# Altium footprint library DW254R-22-16-85.PcbLib: 1 footprints
Each footprint in its own frame and in the unit in brackets; x right, y up, seen from the top. Pads: shape width x height; smd on the part's side, far side on the other; paste and mask are expansions set on the pad; w line width, h text height; cw(c..) or ccw(c..) is an arc to the next point about the centre after c.
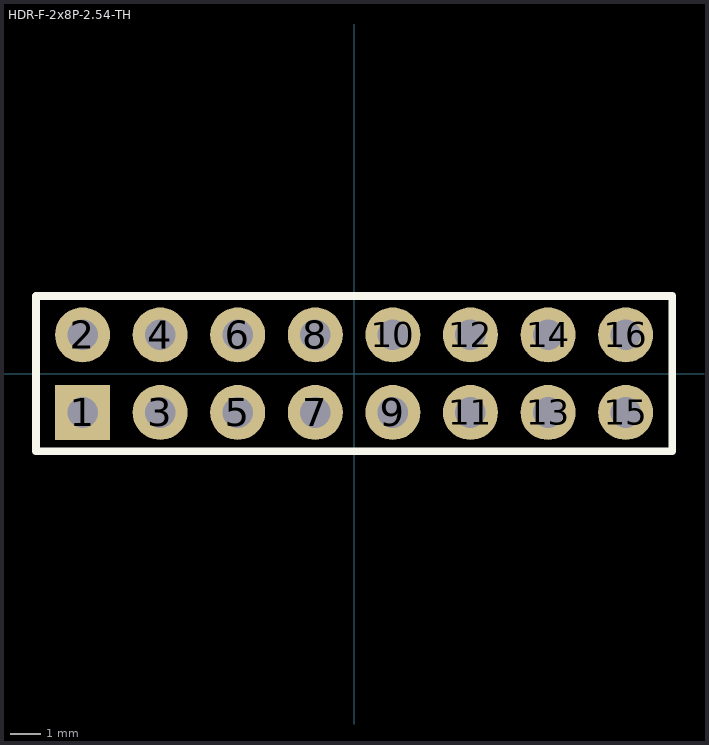
[diagram p0: the footprint, top view; thin cyan lines are the x and y axes]

## HDR-F-2x8P-2.54-TH [mm] "2x8P 间距:2.54mm 直插 插孔结构:2x8P 间距:2.54mm 行距:2.54mm 圆孔/方孔:方孔 安装方式:直插 排数:双排 总孔位数:16P 额定电流:3A 额定电压:- 插孔方向:顶部 塑高:8.5mm 触头材质:黄铜 触头镀层:金 工作温度:- 型号:DW254R-22-16-85 LCSC C2935989 厂牌:DEALON(德艺隆)"
height 1
pads (16):
  rect 1.8x1.8 hole 1 mask+0.05: 1(-8.89,-1.27)
  round 1.8 hole 1 mask+0.05: 2(-8.89,1.27) 3(-6.35,-1.27) 4(-6.35,1.27) 5(-3.81,-1.27) 6(-3.81,1.27) 7(-1.27,-1.27) 8(-1.27,1.27) 9(1.27,-1.27) 10(1.27,1.27) 11(3.81,-1.27) 12(3.81,1.27) 13(6.35,-1.27) 14(6.35,1.27) 15(8.89,-1.27) 16(8.89,1.27)
Top Overlay:
  region: -10.3,-2.5 -10.301,-2.488 -10.304,-2.477 -10.31,-2.467 -10.317,-2.458 -10.327,-2.45 -10.337,-2.445 -10.348,-2.441 -10.36,-2.44 -10.372,-2.441 -10.383,-2.445 -10.393,-2.45 -10.402,-2.458 -10.41,-2.467 -10.415,-2.477 -10.419,-2.488 -10.42,-2.5 -10.419,-2.512 -10.415,-2.523 -10.41,-2.533 -10.402,-2.543 -10.393,-2.55 -10.383,-2.556 -10.372,-2.559 -10.36,-2.56 -10.348,-2.559 -10.337,-2.556 -10.327,-2.55 -10.317,-2.543 -10.31,-2.533 -10.304,-2.523 -10.301,-2.512
  lines w0.254: -10.414,-2.54 -10.414,2.54 10.414,2.54 10.414,-2.54 -10.414,-2.54
3D body "HDR-TH_16P-P2.54-V-F-R2-C8-S2.54.step": height 1, standoff 0, extent -10.52,-2.66 10.514,2.64